# Altium schematic symbol library PhototransistorAmbient Light Indicator.SchLib: 4 symbols
Pins are listed as number, name and electrical type; pins without a type are passive.

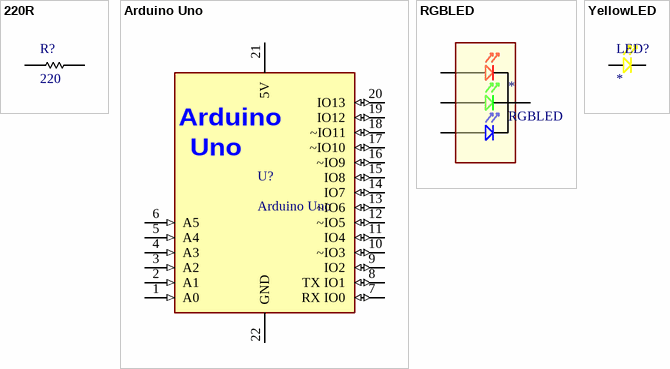
[diagram p0: symbols 220R to YellowLED]

## 220R
designator R?, comment 220
pins: 7, 8

## Arduino Uno
designator U?
pins: 1 A0 (in), 2 A1 (in), 3 A2 (in), 4 A3 (in), 5 A4 (in), 6 A5 (in), 7 RX IO0 (io), 8 TX IO1 (io), 9 IO2 (io), 10 ~IO3 (io), 11 IO4 (io), 12 ~IO5 (io), 13 ~IO6 (io), 14 IO7 (io), 15 IO8 (io), 16 ~IO9 (io), 17 ~IO10 (io), 18 ~IO11 (io), 19 IO12 (io), 20 IO13 (io), 21 5V (power), 22 GND (power)
text: Arduino; Uno

## RGBLED
designator *
pins: 1 Red, 2 Green, 3 Blue, 4

## YellowLED
designator LED?
pins: 9, 10